# Altium footprint library ProjectFootprints.PcbLib: 37 footprints (part 1 of 3)
Each footprint in its own frame and in the unit in brackets; x right, y up, seen from the top. Pads: shape width x height; smd on the part's side, far side on the other; paste and mask are expansions set on the pad; w line width, h text height; cw(c..) or ccw(c..) is an arc to the next point about the centre after c.
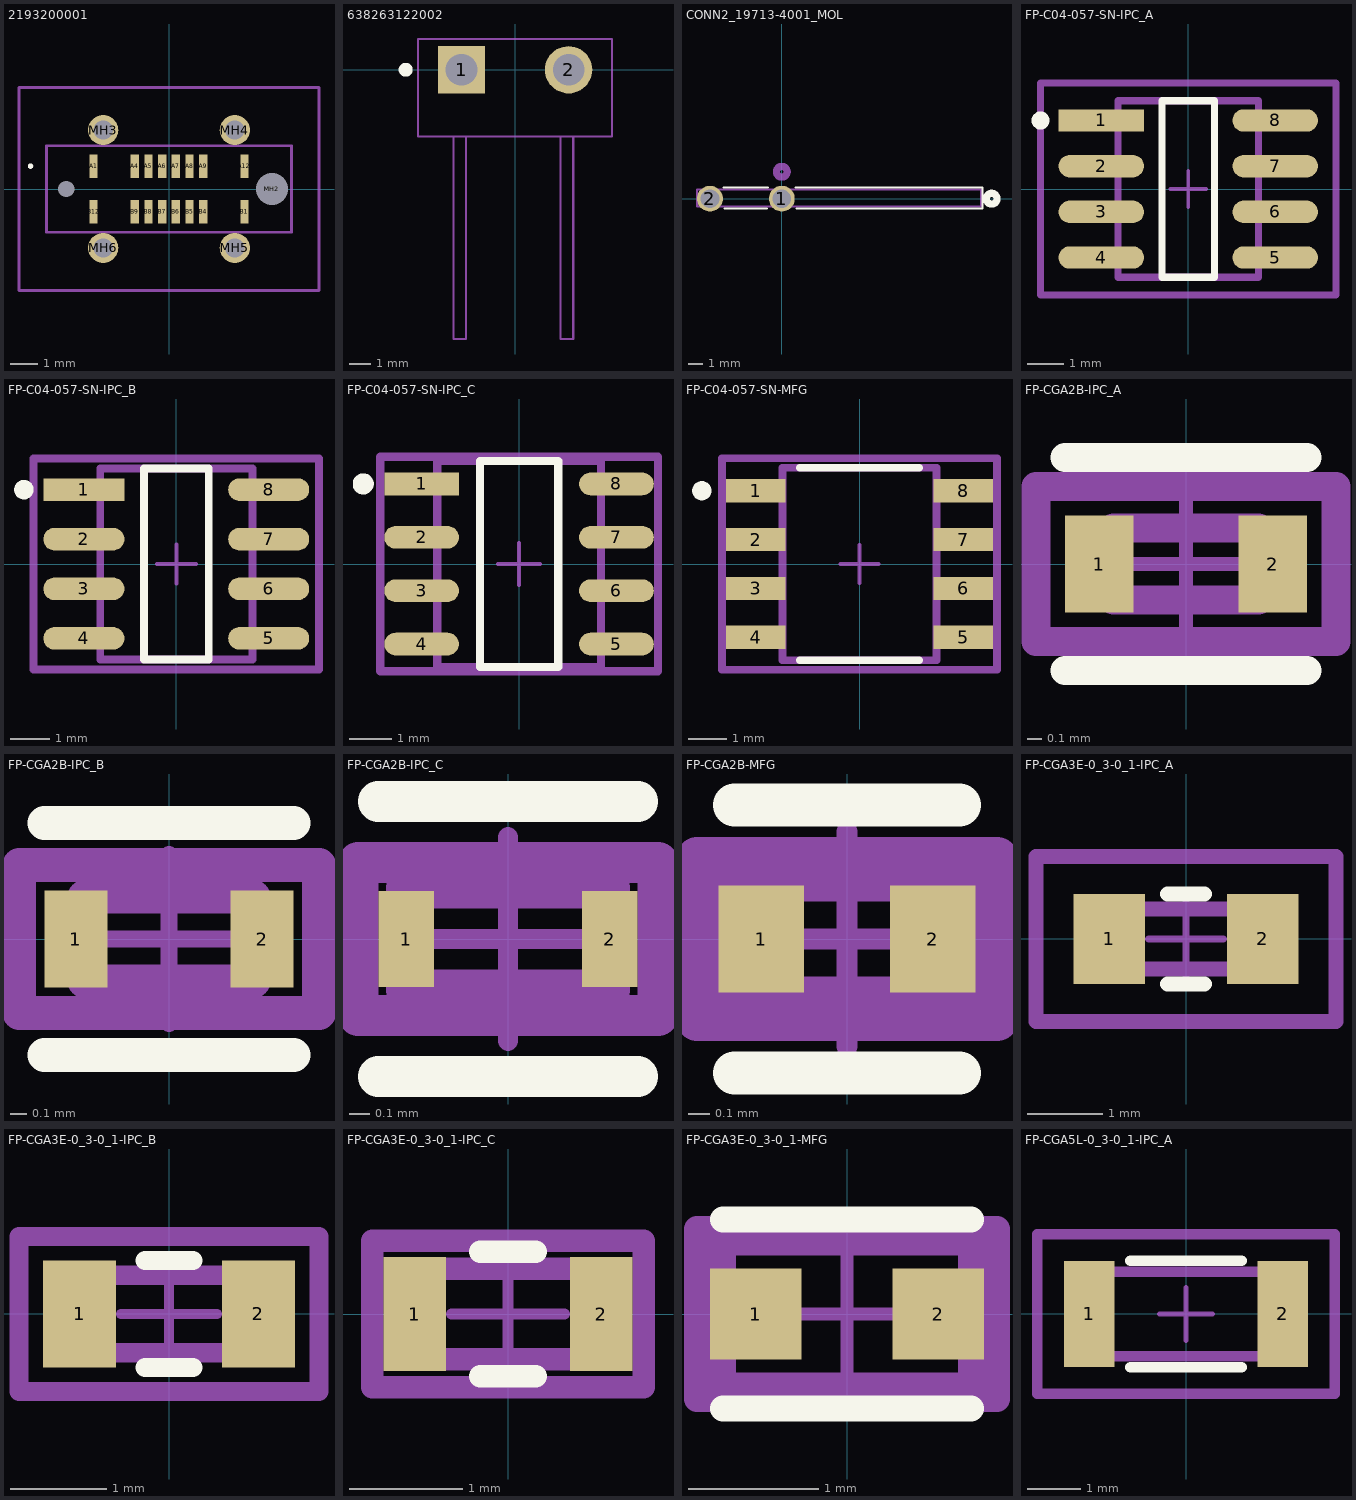
[diagram p0: the footprints below, top view; thin cyan lines are the x and y axes]

## 2193200001 [mm]
pads (22):
  rect 0.3x0.85 smd: A1(-2.75,0.835) A4(-1.25,0.835) A5(-0.75,0.835) A6(-0.25,0.835) A7(0.25,0.835) A8(0.75,0.835) A9(1.25,0.835) A12(2.75,0.835) B1(2.75,-0.835) B4(1.25,-0.835) B5(0.75,-0.835) B6(0.25,-0.835) B7(-0.25,-0.835) B8(-0.75,-0.835) B9(-1.25,-0.835) B12(-2.75,-0.835)
  round 0.3 hole 0.6 unplated: MH1(-3.75,0)
  round 0.585 hole 1.17 unplated: MH2(3.75,0)
  round 1.1 hole 0.7: MH3(-2.4,2.15) MH4(2.4,2.15) MH5(2.4,-2.15) MH6(-2.4,-2.15)
Top Overlay:
  lines w0.1: -5.1,0.835 cw(c-5.05,0.835) -5,0.835 cw(c-5.05,0.835) -5.1,0.835
Top Courtyard:
  lines w0.1: -4.47,-1.58 4.47,-1.58 4.47,1.58 -4.47,1.58 -4.47,-1.58
Bottom Assembly:
  lines w0.1: -5.47,-3.7 5.47,-3.7 5.47,3.7 -5.47,3.7 -5.47,-3.7
3D body "219320-0001.stp": height 8.81, standoff -1.09, extent -4.464,-2.32 4.476,2.28

## 638263122002 [mm]
pads (2):
  rect 2.25x2.25 hole 1.5: 1(-2.54,0)
  round 2.25 hole 1.5: 2(2.54,0)
Top Overlay:
  lines w0.5: -5.27,0 ccw(c-5.19,0) -5.11,0 ccw(c-5.19,0) -5.27,0
Top Assembly:
  lines w0.1: -2.921,-3.175 -2.921,-12.775 -2.321,-12.775 -2.321,-3.175 ; 2.159,-3.175 2.159,-12.775 2.759,-12.775 2.759,-3.175 ; -4.6,-3.175 4.6,-3.175 4.6,1.46 -4.6,1.46 -4.6,-3.175

## CONN2_19713-4001_MOL [mil]
pads (2):
  round 72 hole 52: 1(0,0) 2(-200,0)
Top Overlay:
  lines w6: -162,31 -38,31 ; -159,-27 -41,-27 ; 38,31 559,31 559,-27 41,-27
  lines w20: 569,0 ccw(c584,0) 599,0 ccw(c584,0) 569,0
Bottom Overlay:
  lines w20: 569,0 ccw(c584,0) 599,0 ccw(c584,0) 569,0
Top 3D Body:
  lines w6: -236,-22 554,-22 554,26 -236,26 -236,-22
  lines w20: -15,75 ccw(c0,75) 15,75 ccw(c0,75) -15,75

## FP-C04-057-SN-IPC_A [mm]
pads (8):
  rect 2.377x0.622 smd paste+0 mask+0: 1(-2.418,1.905)
  rrect100% 2.377x0.622 smd paste+0 mask+0: 2(-2.418,0.635) 3(-2.418,-0.635) 4(-2.418,-1.905) 5(2.418,-1.905) 6(2.418,-0.635) 7(2.418,0.635) 8(2.418,1.905)
Top Overlay:
  circle w0.25: c-4.106,1.905 r0.125
  lines w0.2: -0.729,-2.45 -0.729,2.45 0.729,2.45 0.729,-2.45 -0.729,-2.45
Top Assembly:
  lines w0.2: -4.106,-2.95 -4.106,2.95 4.106,2.95 4.106,-2.95 -4.106,-2.95
  text ".Designator" at 0,0.188 h1
Top 3D Body:
  lines w0.2: -1.95,-2.45 -1.95,2.45 1.95,2.45 1.95,-2.45 -1.95,-2.45
Top Courtyard:
  lines w0.2: -4.106,-2.95 -4.106,2.95 4.106,2.95 4.106,-2.95 -4.106,-2.95
Top Component Center:
  lines w0.1: -0.5,0 0.5,0 ; 0,-0.5 0,0.5
3D body "IC_Microchip_24LC1025T-I-SN_eec.STEP": height 0.25, standoff 0, extent -4.106,-2.95 4.106,2.95

## FP-C04-057-SN-IPC_B [mm]
pads (8):
  rect 2.077x0.582 smd paste+0 mask+0: 1(-2.368,1.905)
  rrect100% 2.077x0.582 smd paste+0 mask+0: 2(-2.368,0.635) 3(-2.368,-0.635) 4(-2.368,-1.905) 5(2.368,-1.905) 6(2.368,-0.635) 7(2.368,0.635) 8(2.368,1.905)
Top Overlay:
  circle w0.25: c-3.906,1.905 r0.125
  lines w0.2: -0.829,-2.45 -0.829,2.45 0.829,2.45 0.829,-2.45 -0.829,-2.45
Top Assembly:
  lines w0.2: -3.656,-2.7 -3.656,2.7 3.656,2.7 3.656,-2.7 -3.656,-2.7
  text ".Designator" at 0,0.188 h1
Top 3D Body:
  lines w0.2: -1.95,-2.45 -1.95,2.45 1.95,2.45 1.95,-2.45 -1.95,-2.45
Top Courtyard:
  lines w0.2: -3.656,-2.7 -3.656,2.7 3.656,2.7 3.656,-2.7 -3.656,-2.7
Top Component Center:
  lines w0.1: -0.5,0 0.5,0 ; 0,-0.5 0,0.5
3D body "IC_Microchip_24LC1025T-I-SN_eec.STEP": height 0.25, standoff 0, extent -3.656,-2.7 3.656,2.7

## FP-C04-057-SN-IPC_C [mm]
pads (8):
  rect 1.777x0.542 smd paste+0 mask+0: 1(-2.318,1.905)
  rrect100% 1.777x0.542 smd paste+0 mask+0: 2(-2.318,0.635) 3(-2.318,-0.635) 4(-2.318,-1.905) 5(2.318,-1.905) 6(2.318,-0.635) 7(2.318,0.635) 8(2.318,1.905)
Top Overlay:
  circle w0.25: c-3.706,1.905 r0.125
  lines w0.2: -0.929,-2.45 0.929,-2.45 0.929,2.45 -0.929,2.45 -0.929,-2.45
Top Assembly:
  lines w0.2: -3.306,-2.55 3.306,-2.55 3.306,2.55 -3.306,2.55 -3.306,-2.55
  text ".Designator" at 0,0.188 h1
Top 3D Body:
  lines w0.2: -1.95,-2.45 1.95,-2.45 1.95,2.45 -1.95,2.45 -1.95,-2.45
Top Courtyard:
  lines w0.2: -3.306,-2.55 3.306,-2.55 3.306,2.55 -3.306,2.55 -3.306,-2.55
Top Component Center:
  lines w0.1: -0.5,0 0.5,0 ; 0,-0.5 0,0.5
3D body "IC_Microchip_24LC1025T-I-SN_eec.STEP": height 0.25, standoff 0, extent -3.306,-2.55 3.306,2.55

## FP-C04-057-SN-MFG [mm]
pads (8):
  rect 1.55x0.6 smd paste+0 mask+0: 1(-2.7,1.905) 2(-2.7,0.635) 3(-2.7,-0.635) 4(-2.7,-1.905) 5(2.7,-1.905) 6(2.7,-0.635) 7(2.7,0.635) 8(2.7,1.905)
Top Overlay:
  circle w0.25: c-4.1,1.905 r0.125
  lines w0.2: -1.55,-2.5 1.55,-2.5 ; -1.55,2.5 1.55,2.5
Top Assembly:
  lines w0.2: -3.575,-2.75 -3.575,2.75 3.575,2.75 3.575,-2.75 -3.575,-2.75
  text ".Designator" at 0,0.188 h1
Top 3D Body:
  lines w0.2: -2,-2.5 -2,2.5 2,2.5 2,-2.5 -2,-2.5
Top Courtyard:
  lines w0.2: -3.575,-2.75 -3.575,2.75 3.575,2.75 3.575,-2.75 -3.575,-2.75
Top Component Center:
  lines w0.1: -0.5,0 0.5,0 ; 0,-0.5 0,0.5
3D body "IC_Microchip_24LC1025T-I-SN_eec.STEP": height 0.25, standoff 0, extent -3.575,-2.75 3.575,2.75

## FP-CGA2B-IPC_A [mm]
pads (2):
  rect 0.472x0.672 smd paste+0 mask+0: 1(-0.6,0) 2(0.6,0)
Top Overlay:
  lines w0.2: -0.836,-0.736 0.836,-0.736 ; -0.836,0.736 0.836,0.736
Top Assembly:
  lines w0.2: -1.036,-0.536 -1.036,0.536 1.036,0.536 1.036,-0.536 -1.036,-0.536
  text ".Designator" at 0,0.188 h1
Top 3D Body:
  lines w0.2: -0.5,-0.25 -0.5,0.25 0.5,0.25 0.5,-0.25 -0.5,-0.25
Top Courtyard:
  lines w0.2: -1.036,-0.536 -1.036,0.536 1.036,0.536 1.036,-0.536 -1.036,-0.536
Top Component Center:
  lines w0.1: -0.5,0 0.5,0 ; 0,-0.5 0,0.5
3D body "Cap_TDK_CGA2B1X7R1A154M050BC_eec.STEP": height 0.25, standoff 0, extent -1.036,-0.536 1.036,0.536

## FP-CGA2B-IPC_B [mm]
pads (2):
  rect 0.372x0.572 smd paste+0 mask+0: 1(-0.55,0) 2(0.55,0)
Top Overlay:
  lines w0.2: -0.736,-0.686 0.736,-0.686 ; -0.736,0.686 0.736,0.686
Top Assembly:
  lines w0.2: -0.886,-0.436 -0.886,0.436 0.886,0.436 0.886,-0.436 -0.886,-0.436
  text ".Designator" at 0,0.188 h1
Top 3D Body:
  lines w0.2: -0.5,-0.25 -0.5,0.25 0.5,0.25 0.5,-0.25 -0.5,-0.25
Top Courtyard:
  lines w0.2: -0.886,-0.436 -0.886,0.436 0.886,0.436 0.886,-0.436 -0.886,-0.436
Top Component Center:
  lines w0.1: -0.5,0 0.5,0 ; 0,-0.5 0,0.5
3D body "Cap_TDK_CGA2B1X7R1A154M050BC_eec.STEP": height 0.25, standoff 0, extent -0.886,-0.436 0.886,0.436

## FP-CGA2B-IPC_C [mm]
pads (2):
  rect 0.272x0.472 smd paste+0 mask+0: 1(-0.5,0) 2(0.5,0)
Top Overlay:
  lines w0.2: -0.636,-0.675 0.636,-0.675 ; -0.636,0.675 0.636,0.675
Top Assembly:
  lines w0.2: -0.736,-0.375 -0.736,0.375 0.736,0.375 0.736,-0.375 -0.736,-0.375
  text ".Designator" at 0,0.188 h1
Top 3D Body:
  lines w0.2: -0.5,-0.25 -0.5,0.25 0.5,0.25 0.5,-0.25 -0.5,-0.25
Top Courtyard:
  lines w0.2: -0.736,-0.375 -0.736,0.375 0.736,0.375 0.736,-0.375 -0.736,-0.375
Top Component Center:
  lines w0.1: -0.5,0 0.5,0 ; 0,-0.5 0,0.5
3D body "Cap_TDK_CGA2B1X7R1A154M050BC_eec.STEP": height 0.25, standoff 0, extent -0.736,-0.375 0.736,0.375

## FP-CGA2B-MFG [mm]
pads (2):
  rect 0.4x0.5 smd paste+0 mask+0: 1(-0.4,0) 2(0.4,0)
Top Overlay:
  lines w0.2: -0.525,-0.625 0.525,-0.625 ; -0.525,0.625 0.525,0.625
Top Assembly:
  lines w0.2: -0.7,-0.375 -0.7,0.375 0.7,0.375 0.7,-0.375 -0.7,-0.375
  text ".Designator" at 0,0.188 h1
Top 3D Body:
  lines w0.2: -0.525,-0.275 -0.525,0.275 0.525,0.275 0.525,-0.275 -0.525,-0.275
Top Courtyard:
  lines w0.2: -0.7,-0.375 -0.7,0.375 0.7,0.375 0.7,-0.375 -0.7,-0.375
Top Component Center:
  lines w0.1: -0.5,0 0.5,0 ; 0,-0.5 0,0.5
3D body "Cap_TDK_CGA2B1X7R1A154M050BC_eec.STEP": height 0.25, standoff 0, extent -0.7,-0.375 0.7,0.375

## FP-CGA3E-0_3-0_1-IPC_A [mm]
pads (2):
  rect 0.956x1.206 smd paste+0 mask+0: 1(-1.025,0) 2(1.025,0)
Top Overlay:
  lines w0.2: -0.247,-0.603 0.247,-0.603 ; -0.247,0.603 0.247,0.603
Top Assembly:
  lines w0.2: -2.003,-1.103 2.003,-1.103 2.003,1.103 -2.003,1.103 -2.003,-1.103
  text ".Designator" at 0,0.188 h1
Top 3D Body:
  lines w0.2: -0.8,-0.4 0.8,-0.4 0.8,0.4 -0.8,0.4 -0.8,-0.4
Top Courtyard:
  lines w0.2: -2.003,-1.103 2.003,-1.103 2.003,1.103 -2.003,1.103 -2.003,-1.103
Top Component Center:
  lines w0.1: -0.5,0 0.5,0 ; 0,-0.5 0,0.5
3D body "Cap_TDK_CGA3E3X7R1E334K080AB_eec.STEP": height 0.25, standoff 0, extent -2.003,-1.103 2.003,1.103

## FP-CGA3E-0_3-0_1-IPC_B [mm]
pads (2):
  rect 0.756x1.106 smd paste+0 mask+0: 1(-0.925,0) 2(0.925,0)
Top Overlay:
  lines w0.2: -0.247,-0.553 0.247,-0.553 ; -0.247,0.553 0.247,0.553
Top Assembly:
  lines w0.2: -1.553,-0.803 -1.553,0.803 1.553,0.803 1.553,-0.803 -1.553,-0.803
  text ".Designator" at 0,0.188 h1
Top 3D Body:
  lines w0.2: -0.8,-0.4 -0.8,0.4 0.8,0.4 0.8,-0.4 -0.8,-0.4
Top Courtyard:
  lines w0.2: -1.553,-0.803 -1.553,0.803 1.553,0.803 1.553,-0.803 -1.553,-0.803
Top Component Center:
  lines w0.1: -0.5,0 0.5,0 ; 0,-0.5 0,0.5
3D body "Cap_TDK_CGA3E3X7R1E334K080AB_eec.STEP": height 0.25, standoff 0, extent -1.553,-0.803 1.553,0.803

## FP-CGA3E-0_3-0_1-IPC_C [mm]
pads (2):
  rect 0.556x1.006 smd paste+0 mask+0: 1(-0.825,0) 2(0.825,0)
Top Overlay:
  lines w0.2: -0.247,-0.55 0.247,-0.55 ; -0.247,0.55 0.247,0.55
Top Assembly:
  lines w0.2: -1.203,-0.65 -1.203,0.65 1.203,0.65 1.203,-0.65 -1.203,-0.65
  text ".Designator" at 0,0.188 h1
Top 3D Body:
  lines w0.2: -0.8,-0.4 -0.8,0.4 0.8,0.4 0.8,-0.4 -0.8,-0.4
Top Courtyard:
  lines w0.2: -1.203,-0.65 -1.203,0.65 1.203,0.65 1.203,-0.65 -1.203,-0.65
Top Component Center:
  lines w0.1: -0.5,0 0.5,0 ; 0,-0.5 0,0.5
3D body "Cap_TDK_CGA3E3X7R1E334K080AB_eec.STEP": height 0.25, standoff 0, extent -1.203,-0.65 1.203,0.65

## FP-CGA3E-0_3-0_1-MFG [mm]
pads (2):
  rect 0.7x0.7 smd paste+0 mask+0: 1(-0.7,0) 2(0.7,0)
Top Overlay:
  lines w0.2: -0.95,-0.725 0.95,-0.725 ; -0.95,0.725 0.95,0.725
Top Assembly:
  lines w0.2: -1.15,-0.65 -1.15,0.65 1.15,0.65 1.15,-0.65 -1.15,-0.65
  text ".Designator" at 0,0.188 h1
Top 3D Body:
  lines w0.2: -0.95,-0.55 -0.95,0.55 0.95,0.55 0.95,-0.55 -0.95,-0.55
Top Courtyard:
  lines w0.2: -1.15,-0.65 -1.15,0.65 1.15,0.65 1.15,-0.65 -1.15,-0.65
Top Component Center:
  lines w0.1: -0.5,0 0.5,0 ; 0,-0.5 0,0.5
3D body "Cap_TDK_CGA3E3X7R1E334K080AB_eec.STEP": height 0.25, standoff 0, extent -1.15,-0.65 1.15,0.65

## FP-CGA5L-0_3-0_1-IPC_A [mm]
pads (2):
  rect 0.956x2.006 smd paste+0 mask+0: 1(-1.825,0) 2(1.825,0)
Top Overlay:
  lines w0.2: -1.047,-1.003 1.047,-1.003 ; -1.047,1.003 1.047,1.003
Top Assembly:
  lines w0.2: -2.803,-1.503 -2.803,1.503 2.803,1.503 2.803,-1.503 -2.803,-1.503
  text ".Designator" at 0,0.188 h1
Top 3D Body:
  lines w0.2: -1.6,-0.8 -1.6,0.8 1.6,0.8 1.6,-0.8 -1.6,-0.8
Top Courtyard:
  lines w0.2: -2.803,-1.503 -2.803,1.503 2.803,1.503 2.803,-1.503 -2.803,-1.503
Top Component Center:
  lines w0.1: -0.5,0 0.5,0 ; 0,-0.5 0,0.5
3D body "Cap_TDK_CGA5L2X7R2A154K160AA_eec.STEP": height 0.25, standoff 0, extent -2.803,-1.503 2.803,1.503